# EAGLE library part SYN-HDR-1X6 (library synthetic_all)
SYN-HDR-1X6 Synthetic 1x6 pin header 2.54mm Source: JLCEDA/EasyEDA Official Library (https://lceda.cn/ , https://easyeda.com). Copyright of the library data belongs to JLCEDA/EasyEDA.
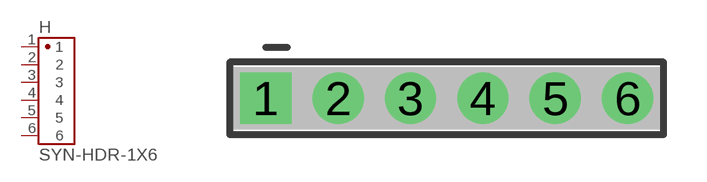
[diagram p0: symbol with the pads of SYN-HDR-TH-1X6-P2.54; footprint SYN-HDR-TH-1X6-P2.54]

Designator prefix H

## SYN-HDR-1X6 (JLCPCB_CLASS: Extended Part; LCSC_PACKAGE: SYN-HDR-TH-1X6-P2.54; LCSC_PART: C9000008; MANUFACTURER: SYN-Maker; MPN: SYN-HDR-1X6; SOURCE: Source: JLCEDA/EasyEDA Official Library (https://lceda.cn/ , https://easyeda.com). Copyright of the library data belongs to JLCEDA/EasyEDA.)  [SYN-HDR-TH-1X6-P2.54]
1  1  pas
2  2  pas
3  3  pas
4  4  pas
5  5  pas
6  6  pas

## Footprint SYN-HDR-TH-1X6-P2.54 (pad centres in mm)
SYN-HDR-TH-1X6-P2.54
drill 1 pad 1.8 square: 1 -6.35,0
drill 1 pad 1.8 round: 2 -3.81,0; 3 -1.27,0; 4 1.27,0; 5 3.81,0; 6 6.35,0